# Altium footprint library 保险丝_Littelfuse 0451003.MRL.PcbLib: 1 footprints
Each footprint in its own frame and in the unit in brackets; x right, y up, seen from the top. Pads: shape width x height; smd on the part's side, far side on the other; paste and mask are expansions set on the pad; w line width, h text height; cw(c..) or ccw(c..) is an arc to the next point about the centre after c.
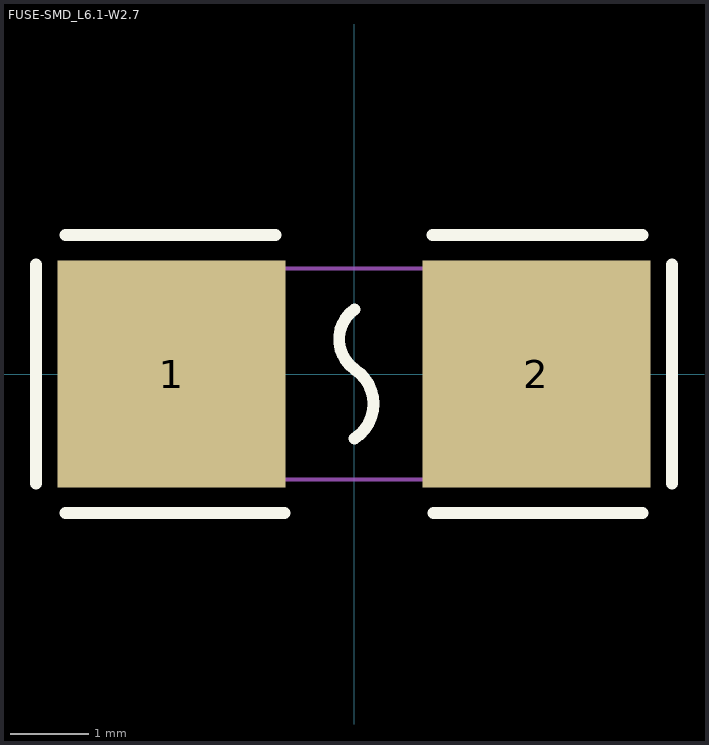
[diagram p0: the footprint, top view; thin cyan lines are the x and y axes]

## FUSE-SMD_L6.1-W2.7 [mm]
pads (2):
  rect 2.91x2.905 smd paste-100 mask+0.051: 1(-2.33,0) 2(2.33,0)
Top Overlay:
  lines w0.152: -4.064,-1.397 -4.064,1.397 ; -3.683,-1.778 -0.889,-1.778 ; -3.683,1.778 -1.002,1.778 ; 0.006,-0.826 ccw(c-0.281,-0.381) 0.006,0.064 cw(c0.277,0.445) 0.006,0.826 ; 1.001,1.778 3.683,1.778 ; 1.016,-1.778 3.683,-1.778 ; 4.064,-1.397 4.064,1.397
Top Paste:
  region: -0.875,-1.353 -0.875,-0.594 -0.975,-0.494 -1.764,-0.494 -1.864,-0.394 -1.864,0.394 -1.764,0.494 -0.975,0.494 -0.875,0.594 -0.875,1.353 -0.975,1.453 -3.685,1.453 -3.785,1.353 -3.785,-1.353 -3.685,-1.453 -0.975,-1.453
  region: 0.875,-1.353 0.875,-0.594 0.975,-0.494 1.764,-0.494 1.864,-0.394 1.864,0.394 1.764,0.494 0.975,0.494 0.875,0.594 0.875,1.353 0.975,1.453 3.685,1.453 3.785,1.353 3.785,-1.353 3.685,-1.453 0.975,-1.453
Mechanical 6:
  lines w0.051: -3.05,-1.345 3.05,-1.345 3.05,1.345 -3.05,1.345 -3.05,-1.345
Mechanical 8:
  region: -2.99,-1.345 -2.99,-1.37 -3.025,-1.405 -3.075,-1.405 -3.11,-1.37 -3.11,-1.345 -3.11,-1.32 -3.075,-1.285 -3.025,-1.285 -2.99,-1.32 -2.99,-1.345
Mechanical 9:
  region: 3.05,-1.345 3.05,1.345 1.6,1.345 1.6,-1.345
  region: -3.05,-1.345 -3.05,1.345 -1.6,1.345 -1.6,-1.345